# Altium footprint library basicfootprints.PcbLib: 522 footprints (part 10 of 33)
Each footprint in its own frame and in the unit in brackets; x right, y up, seen from the top. Pads: shape width x height; smd on the part's side, far side on the other; paste and mask are expansions set on the pad; w line width, h text height; cw(c..) or ccw(c..) is an arc to the next point about the centre after c.
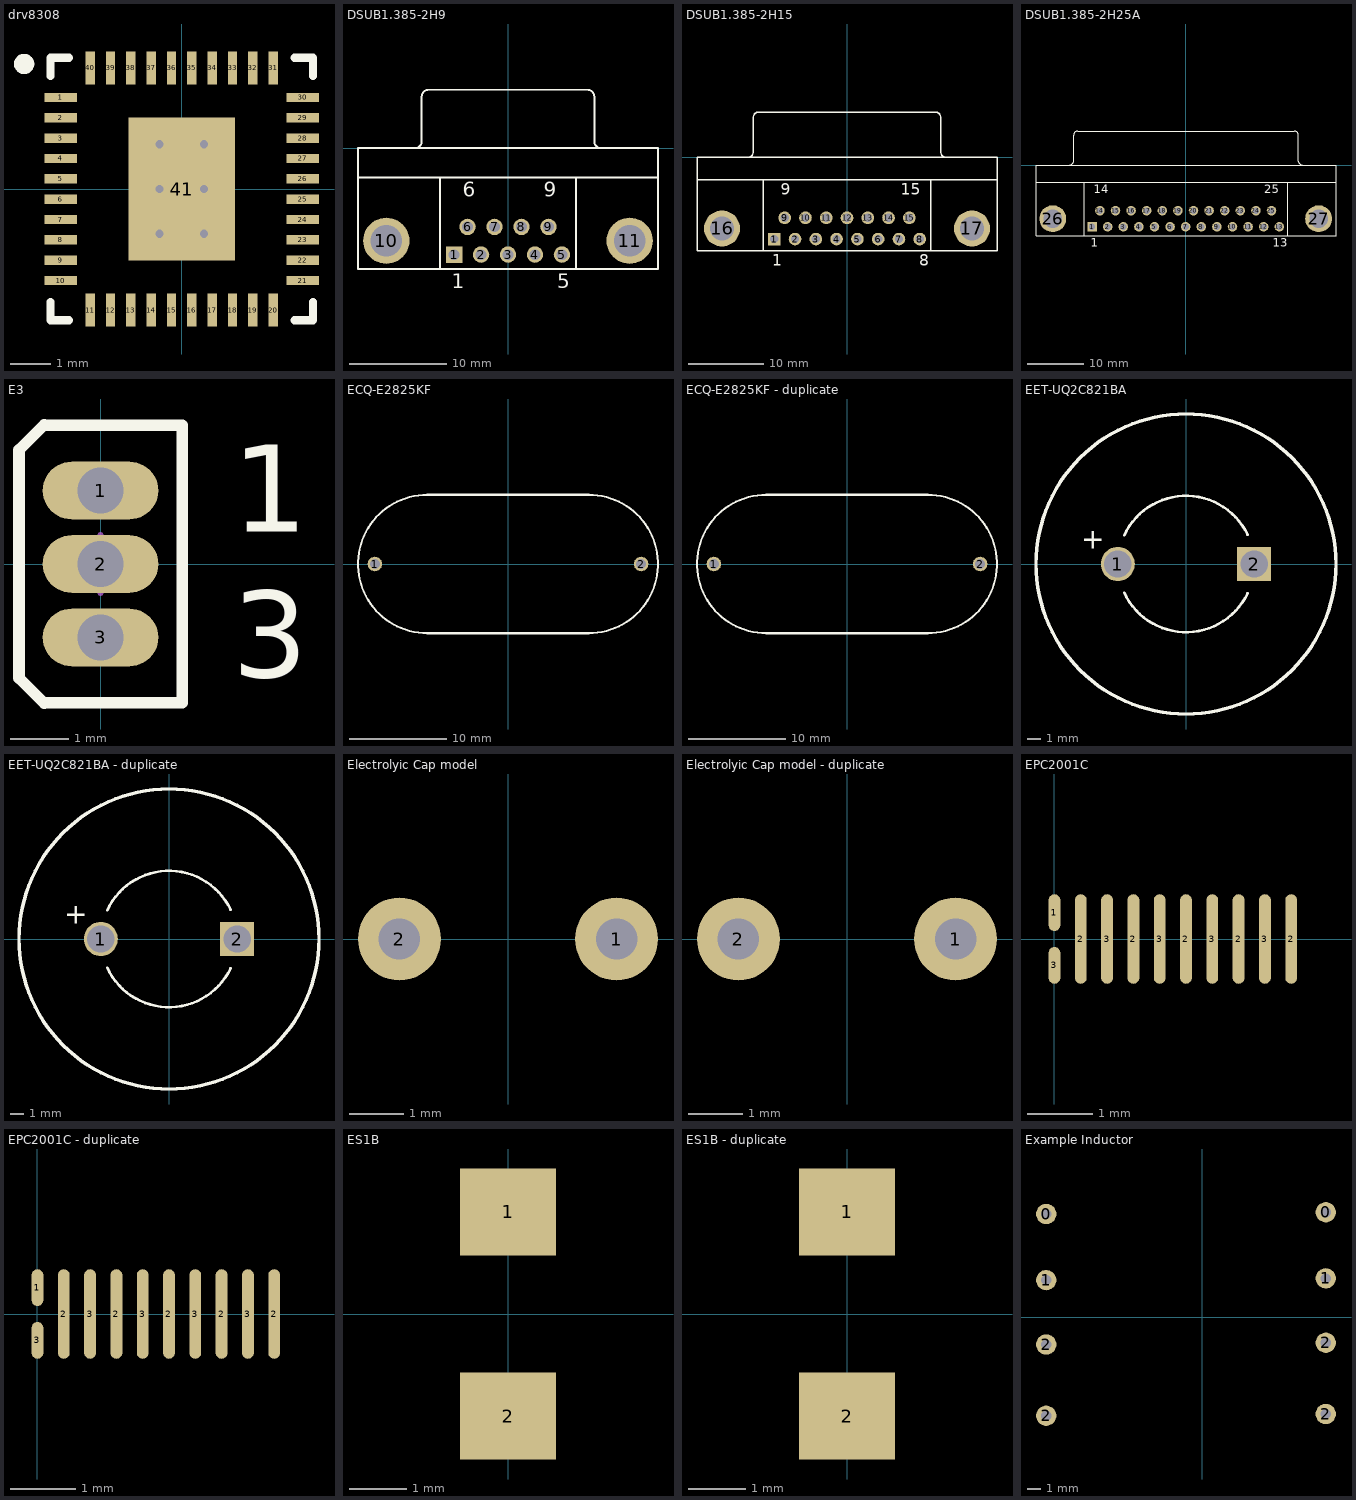
[diagram p9: the footprints below, top view; thin cyan lines are the x and y axes]

## drv8308 [mm] "Brushless DC Motor Controller"
height 1
pads (41):
  rect 0.8x0.23 smd mask+0.05: 1(-2.975,2.25) 2(-2.975,1.75) 3(-2.975,1.25) 4(-2.975,0.75) 5(-2.975,0.25) 6(-2.975,-0.25) 7(-2.975,-0.75) 8(-2.975,-1.25) 9(-2.975,-1.75) 10(-2.975,-2.25) 21(2.975,-2.25) 22(2.975,-1.75) 23(2.975,-1.25) 24(2.975,-0.75) 25(2.975,-0.25) 26(2.975,0.25) 27(2.975,0.75) 28(2.975,1.25) 29(2.975,1.75) 30(2.975,2.25)
  rect 0.23x0.8 smd mask+0.05: 11(-2.25,-2.975) 12(-1.75,-2.975) 13(-1.25,-2.975) 14(-0.75,-2.975) 15(-0.25,-2.975) 16(0.25,-2.975) 17(0.75,-2.975) 18(1.25,-2.975) 19(1.75,-2.975) 20(2.25,-2.975) 31(2.25,2.975) 32(1.75,2.975) 33(1.25,2.975) 34(0.75,2.975) 35(0.25,2.975) 36(-0.25,2.975) 37(-0.75,2.975) 38(-1.25,2.975) 39(-1.75,2.975) 40(-2.25,2.975)
  rect 2.62x3.52 smd: 41(0,0)
via 0.55,-1.1 diameter 0.5 hole 0.2
via -0.55,-1.1 diameter 0.5 hole 0.2
via 0.55,0 diameter 0.5 hole 0.2
via -0.55,0 diameter 0.5 hole 0.2
via 0.55,1.1 diameter 0.5 hole 0.2
via -0.55,1.1 diameter 0.5 hole 0.2
Top Overlay:
  circle w0.25: c-3.875,3.075 r0.125
  lines w0.2: -3.225,-2.775 -3.225,-3.225 -2.775,-3.225 ; -3.225,2.775 -3.225,3.225 -2.775,3.225 ; 2.775,-3.225 3.225,-3.225 3.225,-2.775 ; 2.775,3.225 3.225,3.225 3.225,2.775
3D body: height 1, standoff 0, extent -3.075,-3.075 3.075,3.075

## DSUB1.385-2H9 [mm] "Connector; D Subminiature; 9 Position; Right Angle; Pitch 1.385 mm"
height 12.75
pads (11):
  rect 1.69x1.69 hole 1.09: 1(-5.54,-10.92)
  round 1.69 hole 1.09: 2(-2.77,-10.92) 3(0,-10.92) 4(2.77,-10.92) 5(5.54,-10.92) 6(-4.155,-8.08) 7(-1.385,-8.08) 8(1.385,-8.08) 9(4.155,-8.08)
  round 4.76 hole 3.26: 10(-12.495,-9.5) 11(12.495,-9.5)
Top Overlay:
  lines w0.2: -15.4,-3 15.4,-3 ; -9.56,0.005 ccw(c-9.56,0.7) -8.865,0.7 -8.865,5.3 ; -8.86,5.305 cw(c-8.165,5.305) -8.165,6 8.165,6 cw(c8.165,5.305) 8.86,5.305 ; -7,-12.4 -7,-3 ; 7,-12.4 7,-3 ; 8.865,5.3 8.865,0.7 ccw(c9.56,0.7) 9.56,0.005 ; -15.4,-12.4 -15.4,0 15.4,0 15.4,-12.4 -15.4,-12.4
  text "1" at -5.79,-14.375 h1.5
  text "5" at 5.04,-14.375 h1.5
  text "9" at 3.655,-4.975 h1.5
  text "6" at -4.655,-4.975 h1.5

## DSUB1.385-2H15 [mm] "Connector; D Subminiature; 15 Position; Right Angle; Pitch 1.385 mm"
height 12.75
pads (17):
  rect 1.69x1.69 hole 1.09: 1(-9.695,-10.92)
  round 1.69 hole 1.09: 2(-6.925,-10.92) 3(-4.155,-10.92) 4(-1.385,-10.92) 5(1.385,-10.92) 6(4.155,-10.92) 7(6.925,-10.92) 8(9.695,-10.92) 9(-8.31,-8.08) 10(-5.54,-8.08) 11(-2.77,-8.08) 12(0,-8.08) 13(2.77,-8.08) 14(5.54,-8.08) 15(8.31,-8.08)
  round 4.8 hole 3.18: 16(-16.66,-9.5) 17(16.66,-9.5)
Top Overlay:
  lines w0.2: -20,-3 20,-3 ; -13.195,0.005 ccw(c-13.195,0.7) -12.5,0.7 -12.5,5.3 ; -12.495,5.305 cw(c-11.8,5.305) -11.8,6 11.8,6 cw(c11.8,5.305) 12.495,5.305 ; -11.14,-12.5 -11.14,-3 ; 11.14,-12.5 11.14,-3 ; 12.5,5.3 12.5,0.7 ccw(c13.195,0.7) 13.195,0.005 ; -20,-12.5 -20,0 20,0 20,-12.5 -20,-12.5
  text "1" at -9.945,-14.475 h1.5
  text "8" at 9.652,-14.475 h1.5
  text "15" at 7.185,-4.975 h1.5
  text "9" at -8.81,-4.975 h1.5

## DSUB1.385-2H25A [mm] "Connector; D Subminiature; 25 Position; Right Angle; Pitch 1.385 mm"
height 12.93
pads (27):
  rect 1.69x1.69 hole 1.09: 1(-16.566,-10.92)
  round 1.69 hole 1.09: 2(-13.805,-10.92) 3(-11.044,-10.92) 4(-8.283,-10.92) 5(-5.522,-10.92) 6(-2.761,-10.92) 7(0,-10.92) 8(2.761,-10.92) 9(5.522,-10.92) 10(8.283,-10.92) 11(11.044,-10.92) 12(13.805,-10.92) 13(16.566,-10.92) 14(-15.185,-8.08) 15(-12.424,-8.08) 16(-9.663,-8.08) 17(-6.902,-8.08) 18(-4.141,-8.08) 19(-1.38,-8.08) 20(1.381,-8.08) 21(4.142,-8.08) 22(6.903,-8.08) 23(9.664,-8.08) 24(12.425,-8.08) 25(15.186,-8.08)
  round 4.76 hole 3.26: 26(-23.526,-9.5) 27(23.526,-9.5)
Top Overlay:
  lines w0.2: -26.496,-3 26.604,-3 ; -20.541,0.005 ccw(c-20.541,0.7) -19.846,0.7 -19.846,5.3 ; -19.841,5.305 cw(c-19.146,5.305) -19.146,6 19.254,6 cw(c19.254,5.305) 19.949,5.305 ; -17.946,-12.5 -17.946,-3 ; 18.054,-12.5 18.054,-3 ; 19.954,5.3 19.954,0.7 ccw(c20.649,0.7) 20.649,0.005 ; -26.496,-12.5 -26.496,0 26.604,0 26.604,-12.5 -26.496,-12.5
  text "25" at 13.936,-4.975 h1.5
  text "14" at -16.31,-4.975 h1.5
  text "13" at 15.441,-14.475 h1.5
  text "1" at -16.816,-14.475 h1.5

## E3 [mm] "TO, Flat Index; 3 In-Line, Axial Leads; Body Dia. 4.6mm; Lead Dia. 0.5 mm (max)"
height 4.01
pads (3):
  oval 2x1 hole 0.8: 1(0,1.27) 2(0,0) 3(0,-1.27)
Top Overlay:
  lines w0.2: -0.97,-2.41 -1.41,-1.97 -1.41,1.97 -0.97,2.41 ; -0.97,-2.4 1.41,-2.4 1.41,2.4 -0.97,2.4
  text "3" at 2.275,-1.963 h1.5
  text "1" at 2.275,0.555 h1.5
Mechanical 15:
  lines w0.1: -0.5,0 0.5,0 ; 0,-0.5 0,0.5

## ECQ-E2825KF [mm] "Thin Film Cap, 8.2uF 250V"
pads (2):
  round 1.5 hole 1: 1(-13.75,0) 2(13.75,0)
Top Overlay:
  lines w0.2: -8.35,-7.15 cw(c-8.35,0) -8.35,7.15 ; 8.35,-7.15 ccw(c8.35,0) 8.35,7.15
  lines w0.254: -8.35,-7.15 8.35,-7.15 ; -8.35,7.15 8.35,7.15
3D body: height 25, standoff 1.5, extent -8.382,-7.112 8.392,7.263
3D body: height 25, standoff 1.5, extent 1.27,-7.112 15.514,7.16
3D body: height 25, standoff 1.5, extent -15.621,-7.136 -1.377,7.136

## ECQ-E2825KF - duplicate [mm] "Thin Film Cap, 8.2uF 250V"
pads (2):
  round 1.5 hole 1: 1(-13.75,0) 2(13.75,0)
Top Overlay:
  lines w0.2: -8.35,-7.15 cw(c-8.35,0) -8.35,7.15 ; 8.35,-7.15 ccw(c8.35,0) 8.35,7.15
  lines w0.254: -8.35,-7.15 8.35,-7.15 ; -8.35,7.15 8.35,7.15
3D body: height 25, standoff 1.5, extent -8.382,-7.112 8.392,7.263
3D body: height 25, standoff 1.5, extent 1.27,-7.112 15.514,7.16
3D body: height 25, standoff 1.5, extent -15.621,-7.136 -1.377,7.136

## EET-UQ2C821BA [mm] "Electrolytic Cap"
pads (2):
  round 2.5 hole 2: 1(-5,0)
  rect 2.5x2.5 hole 2: 2(5,0)
Top Overlay:
  circle w0.254: c0,0 r11
  lines w0.2: -4.538,-2.1 ccw(c0,0) 4.514,-2.15 ; -4.538,2.1 cw(c0,0) 4.514,2.15
  text "+" at -5.969,2.413 h1.5
3D body: height 36, standoff 1, extent -10.913,-10.978 11,10.978

## EET-UQ2C821BA - duplicate [mm] "Electrolytic Cap"
pads (2):
  round 2.5 hole 2: 1(-5,0)
  rect 2.5x2.5 hole 2: 2(5,0)
Top Overlay:
  circle w0.254: c0,0 r11
  lines w0.2: -4.538,-2.1 ccw(c0,0) 4.514,-2.15 ; -4.538,2.1 cw(c0,0) 4.514,2.15
  text "+" at -5.969,2.413 h1.5
3D body: height 36, standoff 1, extent -10.913,-10.978 11,10.978

## Electrolyic Cap model [mil]
pads (2):
  round 60 hole 30: 1(78.74,0) 2(-78.74,0)
3D body "User Library-CE_R150_D320_H570.STEP": height 566.93, standoff -114.17, extent -161.41,-161.41 161.42,161.42

## Electrolyic Cap model - duplicate [mil]
pads (2):
  round 60 hole 30: 1(78.74,0) 2(-78.74,0)
3D body "User Library-CE_R150_D320_H570.STEP": height 566.93, standoff -114.17, extent -161.41,-161.41 161.42,161.42

## EPC2001C [mm] "eGaNFET"
pads (11):
  oval 0.18x0.56 smd mask+0.05: 1(0,0.401) 3(0,-0.401)
  oval 0.18x1.362 smd mask+0.05: 2(0.4,0) 2(1.2,0) 2(2,0) 2(2.8,0) 2(3.6,0) 3(0.8,0) 3(1.6,0) 3(2.4,0) 3(3.2,0)
3D body: height 1, standoff 0.1, extent -0.279,-0.814 3.835,0.814

## EPC2001C - duplicate [mm] "eGaNFET"
pads (11):
  oval 0.18x0.56 smd mask+0.05: 1(0,0.401) 3(0,-0.401)
  oval 0.18x1.362 smd mask+0.05: 2(0.4,0) 2(1.2,0) 2(2,0) 2(2.8,0) 2(3.6,0) 3(0.8,0) 3(1.6,0) 3(2.4,0) 3(3.2,0)
3D body: height 1, standoff 0.1, extent -0.279,-0.814 3.835,0.814

## ES1B [mm] "Diode, Ultrafast 150V, 1A"
pads (2):
  rect 1.68x1.52 smd: 1(0,1.79) 2(0,-1.79)

## ES1B - duplicate [mm] "Diode, Ultrafast 150V, 1A"
pads (2):
  rect 1.68x1.52 smd: 1(0,1.79) 2(0,-1.79)

## Example Inductor [mil] "Coilcraft-FA2890-AL"
pads (8):
  round 60 hole 30: 0(-460,305) 0(365,310) 1(-460,110) 1(365,115) 2(-460,-290) 2(-460,-80) 2(365,-285) 2(365,-75)
3D body "Coilcraft-FA2890-AL.STEP": height 830.71, standoff -127.36, extent -612.05,-497.6 510,527.6